# Altium footprint library FPC.PcbLib: 104 footprints (part 3 of 7)
Each footprint in its own frame and in the unit in brackets; x right, y up, seen from the top. Pads: shape width x height; smd on the part's side, far side on the other; paste and mask are expansions set on the pad; w line width, h text height; cw(c..) or ccw(c..) is an arc to the next point about the centre after c.
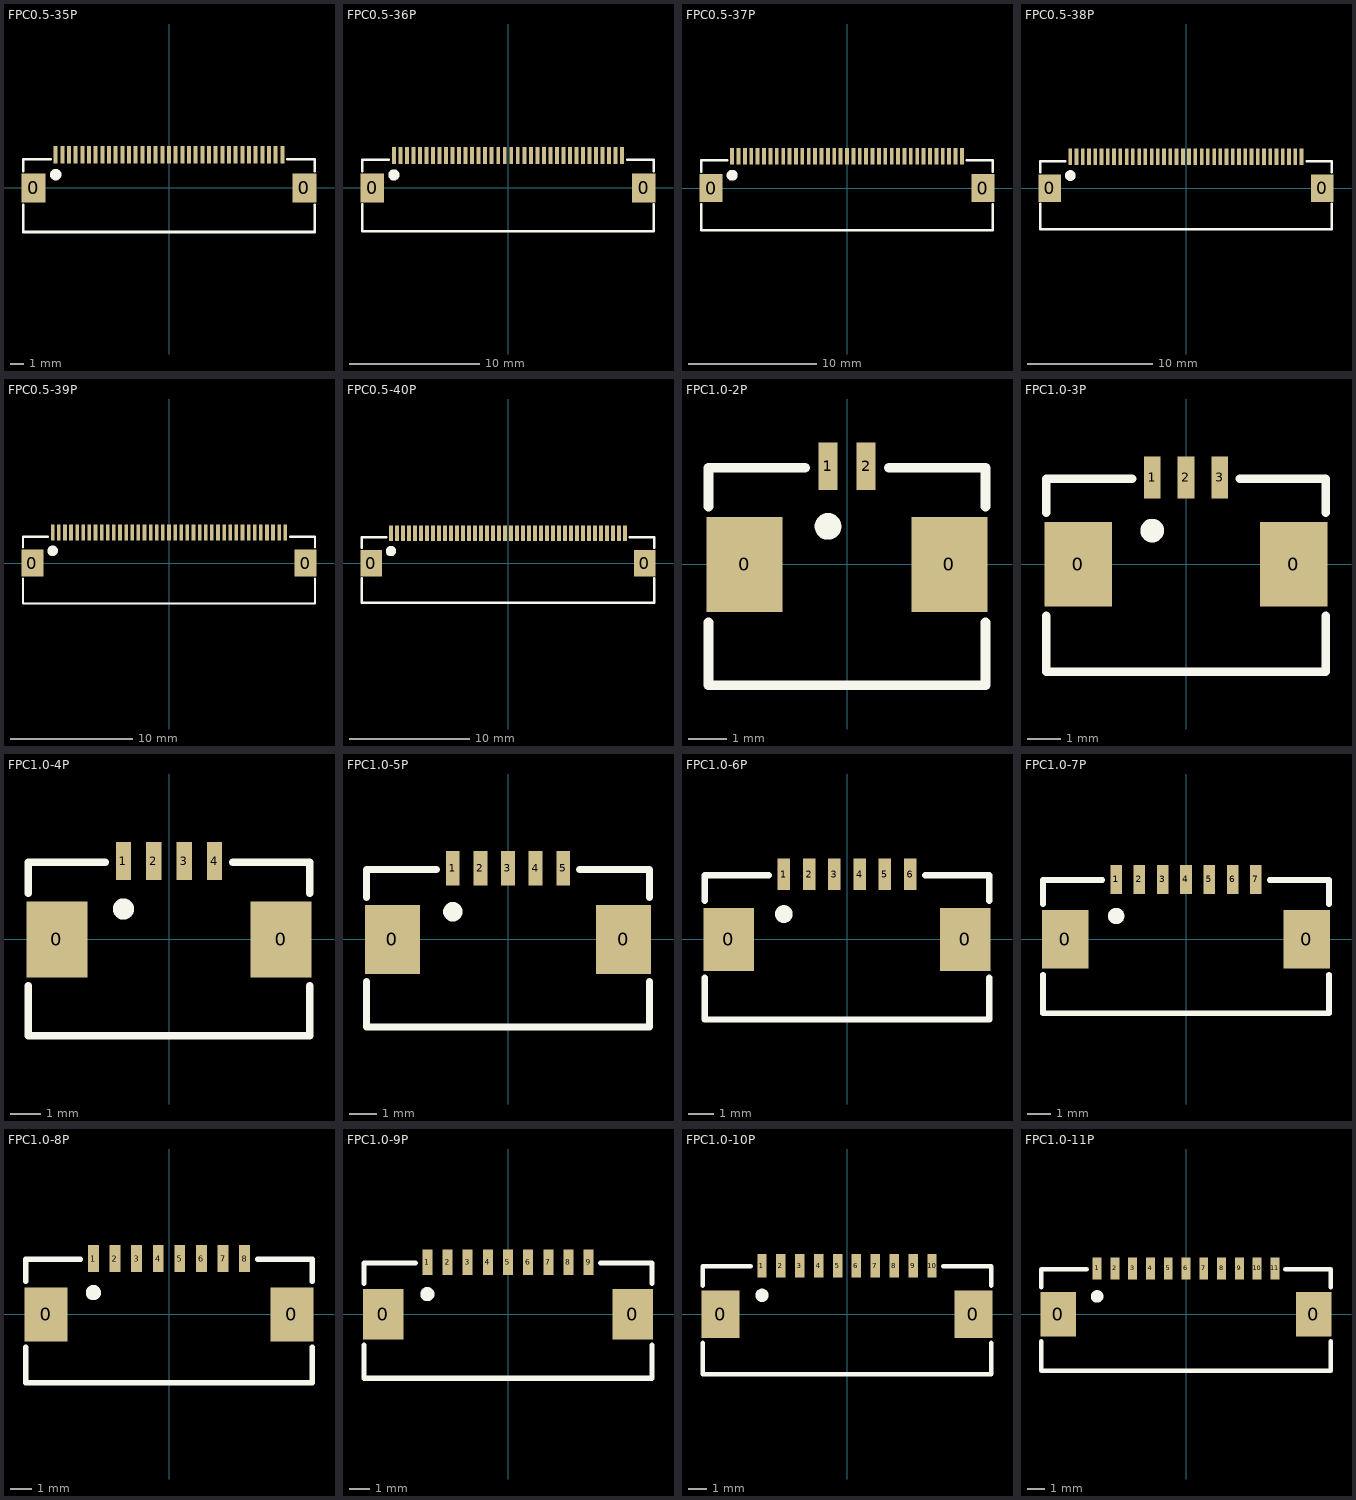
[diagram p2: the footprints below, top view; thin cyan lines are the x and y axes]

## FPC0.5-35P [mm]
pads (37):
  rect 1.8x2.2 smd: 0(-10.15,0) 0(10.15,0)
  rect 0.3x1.3 smd: 1(-8.5,2.497) 2(-8,2.497) 3(-7.5,2.497) 4(-7,2.497) 5(-6.5,2.497) 6(-6,2.497) 7(-5.5,2.497) 8(-5,2.497) 9(-4.5,2.497) 10(-4,2.497) 11(-3.5,2.497) 12(-3,2.497) 13(-2.5,2.497) 14(-2,2.497) 15(-1.5,2.497) 16(-1,2.497) 17(-0.5,2.497) 18(0,2.497) 19(0.5,2.497) 20(1,2.497) 21(1.5,2.497) 22(2,2.497) 23(2.5,2.497) 24(3,2.497) 25(3.5,2.497) 26(4,2.497) 27(4.5,2.497) 28(5,2.497) 29(5.5,2.497) 30(6,2.497) 31(6.5,2.497) 32(7,2.497) 33(7.5,2.497) 34(8,2.497) 35(8.5,2.497)
Top Overlay:
  circle w0.5: c-8.5,1 r0.18
  lines w0.2: -10.925,-1.27 -10.925,-3.302 10.925,-3.302 10.925,-1.27 ; -10.925,1.27 -10.925,2.159 -8.893,2.159 ; 8.893,2.159 10.925,2.159 10.925,1.27
3D body "FPC0.5-35P.STEP": height 2, standoff -0.01, extent -10.846,-3.178 10.854,2.822

## FPC0.5-36P [mm]
pads (38):
  rect 1.8x2.2 smd: 0(-10.4,0) 0(10.4,0)
  rect 0.3x1.3 smd: 1(-8.75,2.497) 2(-8.25,2.497) 3(-7.75,2.497) 4(-7.25,2.497) 5(-6.75,2.497) 6(-6.25,2.497) 7(-5.75,2.497) 8(-5.25,2.497) 9(-4.75,2.497) 10(-4.25,2.497) 11(-3.75,2.497) 12(-3.25,2.497) 13(-2.75,2.497) 14(-2.25,2.497) 15(-1.75,2.497) 16(-1.25,2.497) 17(-0.75,2.497) 18(-0.25,2.497) 19(0.25,2.497) 20(0.75,2.497) 21(1.25,2.497) 22(1.75,2.497) 23(2.25,2.497) 24(2.75,2.497) 25(3.25,2.497) 26(3.75,2.497) 27(4.25,2.497) 28(4.75,2.497) 29(5.25,2.497) 30(5.75,2.497) 31(6.25,2.497) 32(6.75,2.497) 33(7.25,2.497) 34(7.75,2.497) 35(8.25,2.497) 36(8.75,2.497)
Top Overlay:
  circle w0.5: c-8.75,1 r0.18
  lines w0.2: -11.175,-1.27 -11.175,-3.302 11.175,-3.302 11.175,-1.27 ; -11.175,1.27 -11.175,2.159 -9.143,2.159 ; 9.143,2.159 11.175,2.159 11.175,1.27
3D body "FPC0.5-36P.STEP": height 2, standoff -0.01, extent -11.1,-3.152 11.1,2.848

## FPC0.5-37P [mm]
pads (39):
  rect 1.8x2.2 smd: 0(-10.65,0) 0(10.65,0)
  rect 0.3x1.3 smd: 1(-9,2.497) 2(-8.5,2.497) 3(-8,2.497) 4(-7.5,2.497) 5(-7,2.497) 6(-6.5,2.497) 7(-6,2.497) 8(-5.5,2.497) 9(-5,2.497) 10(-4.5,2.497) 11(-4,2.497) 12(-3.5,2.497) 13(-3,2.497) 14(-2.5,2.497) 15(-2,2.497) 16(-1.5,2.497) 17(-1,2.497) 18(-0.5,2.497) 19(0,2.497) 20(0.5,2.497) 21(1,2.497) 22(1.5,2.497) 23(2,2.497) 24(2.5,2.497) 25(3,2.497) 26(3.5,2.497) 27(4,2.497) 28(4.5,2.497) 29(5,2.497) 30(5.5,2.497) 31(6,2.497) 32(6.5,2.497) 33(7,2.497) 34(7.5,2.497) 35(8,2.497) 36(8.5,2.497) 37(9,2.497)
Top Overlay:
  circle w0.5: c-9,1 r0.18
  lines w0.2: -11.425,-1.27 -11.425,-3.302 11.425,-3.302 11.425,-1.27 ; -11.425,1.27 -11.425,2.159 -9.393,2.159 ; 9.393,2.159 11.425,2.159 11.425,1.27
3D body "FPC0.5-37P.STEP": height 2, standoff -0.01, extent -11.354,-3.33 11.346,2.67

## FPC0.5-38P [mm]
pads (40):
  rect 1.8x2.2 smd: 0(-10.9,0) 0(10.9,0)
  rect 0.3x1.3 smd: 1(-9.25,2.497) 2(-8.75,2.497) 3(-8.25,2.497) 4(-7.75,2.497) 5(-7.25,2.497) 6(-6.75,2.497) 7(-6.25,2.497) 8(-5.75,2.497) 9(-5.25,2.497) 10(-4.75,2.497) 11(-4.25,2.497) 12(-3.75,2.497) 13(-3.25,2.497) 14(-2.75,2.497) 15(-2.25,2.497) 16(-1.75,2.497) 17(-1.25,2.497) 18(-0.75,2.497) 19(-0.25,2.497) 20(0.25,2.497) 21(0.75,2.497) 22(1.25,2.497) 23(1.75,2.497) 24(2.25,2.497) 25(2.75,2.497) 26(3.25,2.497) 27(3.75,2.497) 28(4.25,2.497) 29(4.75,2.497) 30(5.25,2.497) 31(5.75,2.497) 32(6.25,2.497) 33(6.75,2.497) 34(7.25,2.497) 35(7.75,2.497) 36(8.25,2.497) 37(8.75,2.497) 38(9.25,2.497)
Top Overlay:
  circle w0.5: c-9.25,1 r0.18
  lines w0.2: -11.675,-1.27 -11.675,-3.302 11.675,-3.302 11.675,-1.27 ; -11.675,1.27 -11.675,2.159 -9.643,2.159 ; 9.643,2.159 11.675,2.159 11.675,1.27
3D body "FPC0.5-38P.STEP": height 2, standoff -0.01, extent -11.582,-3.203 11.618,2.797

## FPC0.5-39P [mm]
pads (41):
  rect 1.8x2.2 smd: 0(-11.15,0) 0(11.15,0)
  rect 0.3x1.3 smd: 1(-9.5,2.497) 2(-9,2.497) 3(-8.5,2.497) 4(-8,2.497) 5(-7.5,2.497) 6(-7,2.497) 7(-6.5,2.497) 8(-6,2.497) 9(-5.5,2.497) 10(-5,2.497) 11(-4.5,2.497) 12(-4,2.497) 13(-3.5,2.497) 14(-3,2.497) 15(-2.5,2.497) 16(-2,2.497) 17(-1.5,2.497) 18(-1,2.497) 19(-0.5,2.497) 20(0,2.497) 21(0.5,2.497) 22(1,2.497) 23(1.5,2.497) 24(2,2.497) 25(2.5,2.497) 26(3,2.497) 27(3.5,2.497) 28(4,2.497) 29(4.5,2.497) 30(5,2.497) 31(5.5,2.497) 32(6,2.497) 33(6.5,2.497) 34(7,2.497) 35(7.5,2.497) 36(8,2.497) 37(8.5,2.497) 38(9,2.497) 39(9.5,2.497)
Top Overlay:
  circle w0.5: c-9.5,1 r0.18
  lines w0.2: -11.925,-1.27 -11.925,-3.302 11.925,-3.302 11.925,-1.27 ; -11.925,1.27 -11.925,2.159 -9.893,2.159 ; 9.893,2.159 11.925,2.159 11.925,1.27
3D body "FPC0.5-39P.STEP": height 2, standoff -0.01, extent -11.836,-3.33 11.864,2.67

## FPC0.5-40P [mm]
pads (42):
  rect 1.8x2.2 smd: 0(-11.4,0) 0(11.4,0)
  rect 0.3x1.3 smd: 1(-9.75,2.497) 2(-9.25,2.497) 3(-8.75,2.497) 4(-8.25,2.497) 5(-7.75,2.497) 6(-7.25,2.497) 7(-6.75,2.497) 8(-6.25,2.497) 9(-5.75,2.497) 10(-5.25,2.497) 11(-4.75,2.497) 12(-4.25,2.497) 13(-3.75,2.497) 14(-3.25,2.497) 15(-2.75,2.497) 16(-2.25,2.497) 17(-1.75,2.497) 18(-1.25,2.497) 19(-0.75,2.497) 20(-0.25,2.497) 21(0.25,2.497) 22(0.75,2.497) 23(1.25,2.497) 24(1.75,2.497) 25(2.25,2.497) 26(2.75,2.497) 27(3.25,2.497) 28(3.75,2.497) 29(4.25,2.497) 30(4.75,2.497) 31(5.25,2.497) 32(5.75,2.497) 33(6.25,2.497) 34(6.75,2.497) 35(7.25,2.497) 36(7.75,2.497) 37(8.25,2.497) 38(8.75,2.497) 39(9.25,2.497) 40(9.75,2.497)
Top Overlay:
  circle w0.5: c-9.75,1 r0.18
  lines w0.2: -12.175,-1.27 -12.175,-3.302 12.175,-3.302 12.175,-1.27 ; -12.175,1.27 -12.175,2.159 -10.143,2.159 ; 10.143,2.159 12.175,2.159 12.175,1.27
3D body "FPC0.5-40P.STEP": height 2, standoff -0.01, extent -12.09,-3.229 12.11,2.771

## FPC1.0-2P [mm]
pads (4):
  rect 2x2.5 smd: 0(-2.69,0) 0(2.69,0)
  rect 0.5x1.25 smd: 1(-0.5,2.575) 2(0.5,2.575)
Top Overlay:
  circle w0.5: c-0.5,1 r0.1
  lines w0.254: -3.636,-1.524 -3.636,-3.175 3.636,-3.175 3.636,-1.524 ; -3.636,1.524 -3.636,2.54 -1.096,2.54 ; 1.096,2.54 3.636,2.54 3.636,1.524
3D body "FPC1.0-2P.STEP": height 2, standoff -0.01, extent -3.45,-3 3.45,3

## FPC1.0-3P [mm]
pads (5):
  rect 2x2.5 smd: 0(-3.19,0) 0(3.19,0)
  rect 0.5x1.25 smd: 1(-1,2.575) 2(0,2.575) 3(1,2.575)
Top Overlay:
  circle w0.5: c-1,1 r0.1
  lines w0.254: -4.136,-1.524 -4.136,-3.175 4.136,-3.175 4.136,-1.524 ; -4.136,1.524 -4.136,2.54 -1.596,2.54 ; 1.596,2.54 4.136,2.54 4.136,1.524
3D body "FPC1.0-3P.STEP": height 2, standoff -0.01, extent -3.9,-3 4,3

## FPC1.0-4P [mm]
pads (6):
  rect 2x2.5 smd: 0(-3.69,0) 0(3.69,0)
  rect 0.5x1.25 smd: 1(-1.5,2.575) 2(-0.5,2.575) 3(0.5,2.575) 4(1.5,2.575)
Top Overlay:
  circle w0.5: c-1.5,1 r0.1
  lines w0.254: -4.636,-1.524 -4.636,-3.175 4.636,-3.175 4.636,-1.524 ; -4.636,1.524 -4.636,2.54 -2.096,2.54 ; 2.096,2.54 4.636,2.54 4.636,1.524
3D body "FPC1.0-4P.STEP": height 2, standoff -0.01, extent -4.45,-3 4.45,3

## FPC1.0-5P [mm]
pads (7):
  rect 2x2.5 smd: 0(-4.19,0) 0(4.19,0)
  rect 0.5x1.25 smd: 1(-2,2.575) 2(-1,2.575) 3(0,2.575) 4(1,2.575) 5(2,2.575)
Top Overlay:
  circle w0.5: c-2,1 r0.1
  lines w0.254: -5.136,-1.524 -5.136,-3.175 5.136,-3.175 5.136,-1.524 ; -5.136,1.524 -5.136,2.54 -2.596,2.54 ; 2.596,2.54 5.136,2.54 5.136,1.524
3D body "FPC1.0-5P.STEP": height 2, standoff -0.01, extent -5,-3 4.9,3

## FPC1.0-6P [mm]
pads (8):
  rect 2x2.5 smd: 0(-4.69,0) 0(4.69,0)
  rect 0.5x1.25 smd: 1(-2.5,2.575) 2(-1.5,2.575) 3(-0.5,2.575) 4(0.5,2.575) 5(1.5,2.575) 6(2.5,2.575)
Top Overlay:
  circle w0.5: c-2.5,1 r0.1
  lines w0.254: -5.636,-1.524 -5.636,-3.175 5.636,-3.175 5.636,-1.524 ; -5.636,1.524 -5.636,2.54 -3.096,2.54 ; 3.096,2.54 5.636,2.54 5.636,1.524
3D body "FPC1.0-7P.STEP": height 2, standoff -0.01, extent -5.45,-3.175 5.45,2.825

## FPC1.0-7P [mm]
pads (9):
  rect 2x2.5 smd: 0(-5.19,0) 0(5.19,0)
  rect 0.5x1.25 smd: 1(-3,2.575) 2(-2,2.575) 3(-1,2.575) 4(0,2.575) 5(1,2.575) 6(2,2.575) 7(3,2.575)
Top Overlay:
  circle w0.5: c-3,1 r0.1
  lines w0.254: -6.136,-1.524 -6.136,-3.175 6.136,-3.175 6.136,-1.524 ; -6.136,1.524 -6.136,2.54 -3.596,2.54 ; 3.596,2.54 6.136,2.54 6.136,1.524
3D body "FPC1.0-6P.STEP": height 2, standoff -0.01, extent -5.95,-3 5.95,3

## FPC1.0-8P [mm]
pads (10):
  rect 2x2.5 smd: 0(-5.69,0) 0(5.69,0)
  rect 0.5x1.25 smd: 1(-3.5,2.575) 2(-2.5,2.575) 3(-1.5,2.575) 4(-0.5,2.575) 5(0.5,2.575) 6(1.5,2.575) 7(2.5,2.575) 8(3.5,2.575)
Top Overlay:
  circle w0.5: c-3.5,1 r0.1
  lines w0.254: -6.636,-1.524 -6.636,-3.175 6.636,-3.175 6.636,-1.524 ; -6.636,1.524 -6.636,2.54 -4.096,2.54 ; 4.096,2.54 6.636,2.54 6.636,1.524
3D body "FPC1.0-8P.STEP": height 2, standoff -0.01, extent -6.45,-3 6.45,3

## FPC1.0-9P [mm]
pads (11):
  rect 2x2.5 smd: 0(-6.19,0) 0(6.19,0)
  rect 0.5x1.25 smd: 1(-4,2.575) 2(-3,2.575) 3(-2,2.575) 4(-1,2.575) 5(0,2.575) 6(1,2.575) 7(2,2.575) 8(3,2.575) 9(4,2.575)
Top Overlay:
  circle w0.5: c-4,1 r0.1
  lines w0.254: -7.136,-1.524 -7.136,-3.175 7.136,-3.175 7.136,-1.524 ; -7.136,1.524 -7.136,2.54 -4.596,2.54 ; 4.596,2.54 7.136,2.54 7.136,1.524
3D body "FPC1.0-9P.STEP": height 2, standoff -0.01, extent -6.95,-3 6.95,3

## FPC1.0-10P [mm]
pads (12):
  rect 2x2.5 smd: 0(-6.69,0) 0(6.69,0)
  rect 0.5x1.25 smd: 1(-4.5,2.575) 2(-3.5,2.575) 3(-2.5,2.575) 4(-1.5,2.575) 5(-0.5,2.575) 6(0.5,2.575) 7(1.5,2.575) 8(2.5,2.575) 9(3.5,2.575) 10(4.5,2.575)
Top Overlay:
  circle w0.5: c-4.5,1 r0.1
  lines w0.254: -7.636,-1.524 -7.636,-3.175 7.636,-3.175 7.636,-1.524 ; -7.636,1.524 -7.636,2.54 -5.096,2.54 ; 5.096,2.54 7.636,2.54 7.636,1.524
3D body "FPC1.0-10P.STEP": height 2, standoff -0.01, extent -7.45,-3 7.45,3

## FPC1.0-11P [mm]
pads (13):
  rect 2x2.5 smd: 0(-7.19,0) 0(7.19,0)
  rect 0.5x1.25 smd: 1(-5,2.575) 2(-4,2.575) 3(-3,2.575) 4(-2,2.575) 5(-1,2.575) 6(0,2.575) 7(1,2.575) 8(2,2.575) 9(3,2.575) 10(4,2.575) 11(5,2.575)
Top Overlay:
  circle w0.5: c-5,1 r0.1
  lines w0.254: -8.136,-1.524 -8.136,-3.175 8.136,-3.175 8.136,-1.524 ; -8.136,1.524 -8.136,2.54 -5.596,2.54 ; 5.596,2.54 8.136,2.54 8.136,1.524
3D body "FPC1.0-11P.STEP": height 2, standoff -0.01, extent -7.95,-3 7.95,3